# Altium footprint library CRG0805F10K.PcbLib: 3 footprints
Each footprint in its own frame and in the unit in brackets; x right, y up, seen from the top. Pads: shape width x height; smd on the part's side, far side on the other; paste and mask are expansions set on the pad; w line width, h text height; cw(c..) or ccw(c..) is an arc to the next point about the centre after c.
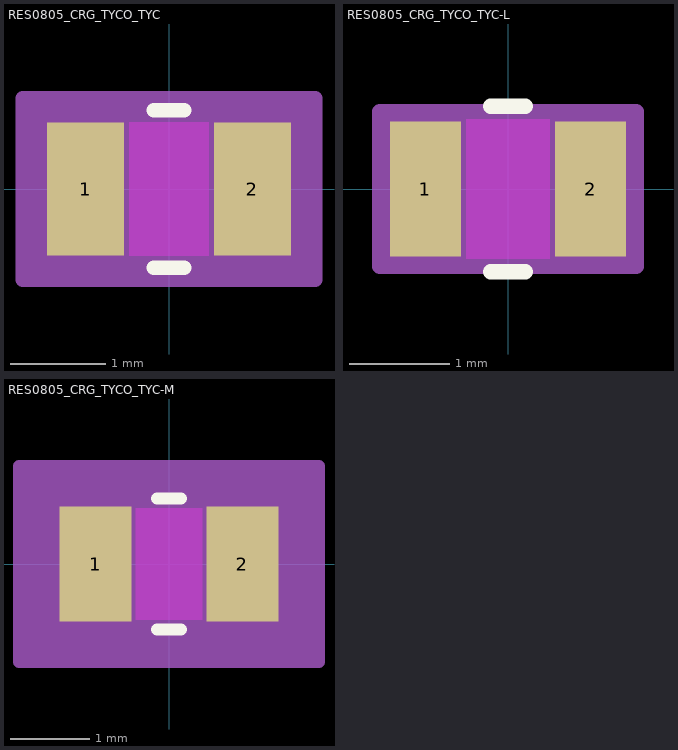
[diagram p0: the footprints below, top view; thin cyan lines are the x and y axes]

## RES0805_CRG_TYCO_TYC [mil]
pads (2):
  rect 31.87x55 smd paste+0 mask+0: 1(-34.44,0) 2(34.44,0)
Top Layer keep-out:
  region: -16.5,-25.5 -16.5,25.5 16.5,25.5 16.5,-25.5
Top Overlay:
  lines w6: -6.39,-32.5 6.39,-32.5 ; -6.39,32.5 6.39,32.5
  text ".Designator" at -137.5,-25 h50
Keep-Out Layer:
  region: -16.5,-27.5 -16.5,27.5 16.5,27.5 16.5,-27.5
Mechanical 13:
  lines w1: -42.5,-27.5 -42.5,27.5 ; -42.5,-27.5 -18.5,-27.5 -18.5,27.5 -42.5,27.5 ; -42.5,-27.5 42.5,-27.5 ; -42.5,-27.5 -42.5,27.5 ; -42.5,27.5 42.5,27.5 ; 42.5,-27.5 18.5,-27.5 18.5,27.5 42.5,27.5 ; 42.5,-27.5 42.5,27.5 ; 42.5,-27.5 42.5,27.5
  text ".Designator" at -137.5,-25 h50
Mechanical 15:
  region: 60.37,-37.5 -60.37,-37.5 -60.37,37.5 60.37,37.5
  lines w6: -60.37,-37.5 -60.37,37.5 60.37,37.5 60.37,-37.5 -60.37,-37.5
3D body "RES0805_CRG_TYCO_TYC.step": height 25.98, standoff 0, extent -42.52,-27.48 42.52,27.48

## RES0805_CRG_TYCO_TYC-L [mil]
pads (2):
  rect 27.94x53.03 smd paste+0 mask+0: 1(-32.47,0) 2(32.47,0)
Top Layer keep-out:
  region: -16.5,-25.5 -16.5,25.5 16.5,25.5 16.5,-25.5
Top Overlay:
  lines w6: -6.85,-32.5 6.85,-32.5 ; -6.85,32.5 6.85,32.5
  text ".Designator" at -137.5,-25 h50
Keep-Out Layer:
  region: -16.5,-27.5 -16.5,27.5 16.5,27.5 16.5,-27.5
Mechanical 13:
  lines w1: -42.5,-27.5 -42.5,27.5 ; -42.5,-27.5 -18.5,-27.5 -18.5,27.5 -42.5,27.5 ; -42.5,-27.5 42.5,-27.5 ; -42.5,-27.5 -42.5,27.5 ; -42.5,27.5 42.5,27.5 ; 42.5,-27.5 18.5,-27.5 18.5,27.5 42.5,27.5 ; 42.5,-27.5 42.5,27.5 ; 42.5,-27.5 42.5,27.5
  text ".Designator" at -137.5,-25 h50
Mechanical 15:
  region: 50.44,-30.52 -50.44,-30.52 -50.44,30.52 50.44,30.52
  lines w6: -50.44,-30.52 -50.44,30.52 50.44,30.52 50.44,-30.52 -50.44,-30.52
3D body "RES0805_CRG_TYCO_TYC.step": height 25.98, standoff 0, extent -42.52,-27.48 42.52,27.48

## RES0805_CRG_TYCO_TYC-M [mil]
pads (2):
  rect 35.81x56.97 smd paste+0 mask+0: 1(-36.41,0) 2(36.41,0)
Top Layer keep-out:
  region: -16.5,-25.5 -16.5,25.5 16.5,25.5 16.5,-25.5
Top Overlay:
  lines w6: -6.03,-32.5 6.03,-32.5 ; -6.03,32.5 6.03,32.5
  text ".Designator" at -137.5,-25 h50
Keep-Out Layer:
  region: -16.5,-27.5 -16.5,27.5 16.5,27.5 16.5,-27.5
Mechanical 13:
  lines w1: -42.5,-27.5 -42.5,27.5 ; -42.5,-27.5 -18.5,-27.5 -18.5,27.5 -42.5,27.5 ; -42.5,-27.5 42.5,-27.5 ; -42.5,-27.5 -42.5,27.5 ; -42.5,27.5 42.5,27.5 ; 42.5,-27.5 18.5,-27.5 18.5,27.5 42.5,27.5 ; 42.5,-27.5 42.5,27.5 ; 42.5,-27.5 42.5,27.5
  text ".Designator" at -137.5,-25 h50
Mechanical 15:
  region: 74.31,-48.48 -74.31,-48.48 -74.31,48.48 74.31,48.48
  lines w6: -74.31,-48.48 -74.31,48.48 74.31,48.48 74.31,-48.48 -74.31,-48.48
3D body "RES0805_CRG_TYCO_TYC.step": height 25.98, standoff 0, extent -42.52,-27.48 42.52,27.48